# Altium integrated library CD4050BDWR.IntLib: 1 symbol
Pins are listed as number, name and electrical type; pins without a type are passive.

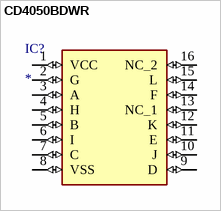
[diagram p0: symbol CD4050BDWR]

## CD4050BDWR
designator IC?
6-ch, 3-V to 18-V buffers; MF: Texas Instruments; MP: CD4050BDWR; SnapEDA_Link: https://www.snapeda.com/parts/CD4050BDWR/Texas+Instruments/view-part/?ref=snap; Package: SOIC-16 Texas Instruments; Value: *; Check_prices: https://www.snapeda.com/parts/CD4050BDWR/Texas+Instruments/view-part/?ref=eda
footprint SOIC127P1030X265-16N
pins: 1 VCC (io), 2 G (io), 3 A (io), 4 H (io), 5 B (io), 6 I (io), 7 C (io), 8 VSS (io), 9 D (io), 10 J (io), 11 E (io), 12 K (io), 13 NC_1 (io), 14 F (io), 15 L (io), 16 NC_2 (io)